# Altium integrated library CL21C222JBFNNNE.IntLib: 1 symbol
Pins are listed as number, name and electrical type; pins without a type are passive.

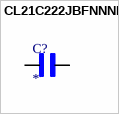
[diagram p0: symbol CL21C222JBFNNNE]

## CL21C222JBFNNNE
designator C?
2200 pF Â±5% 50V Ceramic Capacitor C0G, NP0 0805 (2012 Metric); MF: Samsung Electro-Mechanics; MP: CL21C222JBFNNNE; SnapEDA_Link: https://www.snapeda.com/parts/CL21C222JBFNNNE/Samsung/view-part/?ref=snap; Package: SMD-2 Samsung; Value: *; Check_prices: https://www.snapeda.com/parts/CL21C222JBFNNNE/Samsung/view-part/?ref=eda
footprint CAPC2012X135N
pins: 1, 2